# Altium footprint library General.PcbLib: 40 footprints (part 1 of 3)
Each footprint in its own frame and in the unit in brackets; x right, y up, seen from the top. Pads: shape width x height; smd on the part's side, far side on the other; paste and mask are expansions set on the pad; w line width, h text height; cw(c..) or ccw(c..) is an arc to the next point about the centre after c.
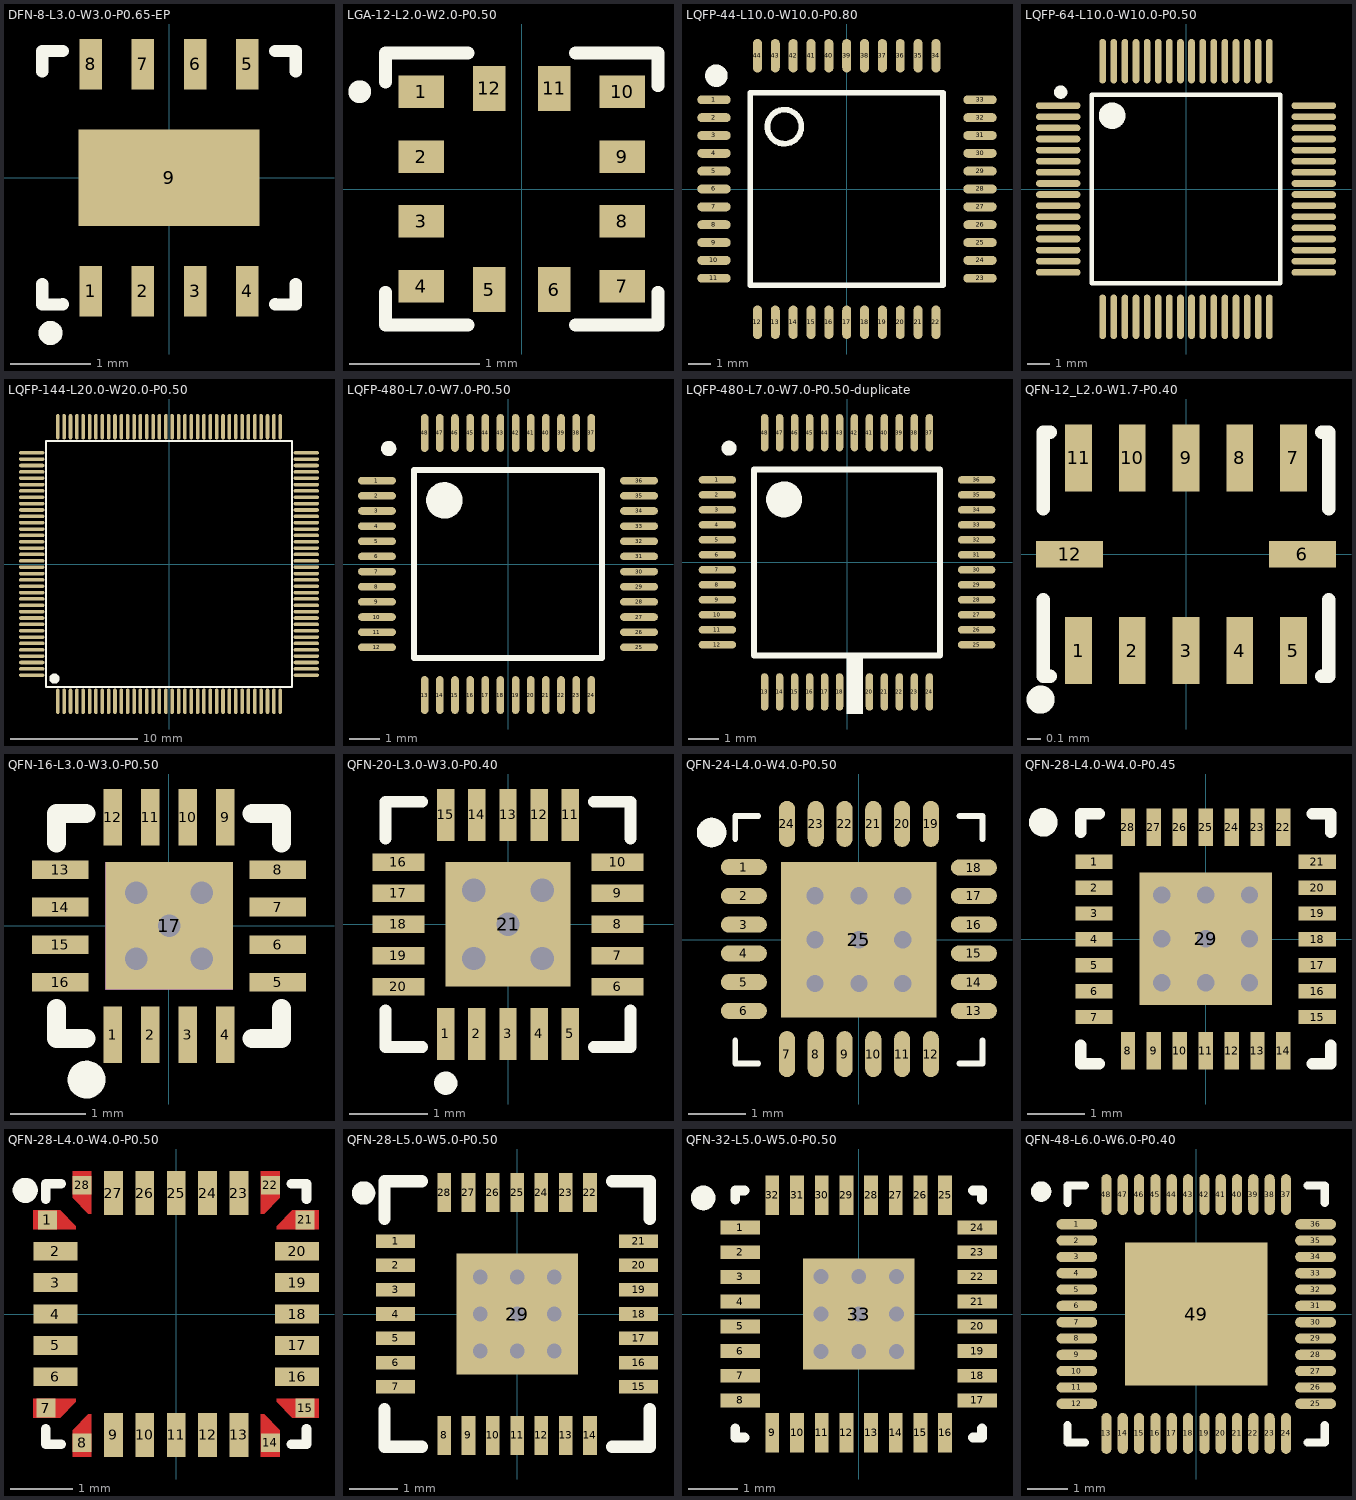
[diagram p0: the footprints below, top view; thin cyan lines are the x and y axes]

## DFN-8-L3.0-W3.0-P0.65-EP [mm] "SIT3088ETK"
pads (9):
  rect 0.28x0.625 smd mask+0.05: 1(-0.975,-1.412) 2(-0.325,-1.412) 3(0.325,-1.412) 4(0.975,-1.412) 5(0.975,1.412) 6(0.325,1.412) 7(-0.325,1.412) 8(-0.975,1.412)
  rect 2.25x1.2 smd mask+0.05: 9(0,0)
Top Overlay:
  circle w0.15: c-1.473,-1.93 r0.075
  lines w0.152: -1.576,-1.32 -1.576,-1.576 -1.321,-1.575 ; -1.576,1.32 -1.576,1.576 -1.321,1.575 ; 1.321,-1.575 1.576,-1.576 1.576,-1.32 ; 1.321,1.575 1.576,1.576 1.576,1.32
3D body "DFN-8-EP(3x3).STEP": height 0.91, standoff 0, extent -1.5,-1.51 1.5,1.51

## LGA-12-L2.0-W2.0-P0.50 [mm] "LIS2DW12TR"
pads (12):
  rect 0.35x0.25 smd mask+0.05: 1(-0.775,0.75) 2(-0.775,0.25) 3(-0.775,-0.25) 4(-0.775,-0.75) 7(0.775,-0.75) 8(0.775,-0.25) 9(0.775,0.25) 10(0.775,0.75)
  rect 0.25x0.35 smd mask+0.05: 5(-0.25,-0.775) 6(0.25,-0.775) 11(0.25,0.775) 12(-0.25,0.775)
Top Overlay:
  circle w0.15: c-1.25,0.75 r0.013
  lines w0.1: -1.051,-0.796 -1.051,-1.05 -0.416,-1.05 ; -1.05,0.824 -1.05,1.05 -0.415,1.05 ; 0.415,-1.05 1.05,-1.05 1.05,-0.796 ; 0.415,1.05 1.05,1.05 1.05,0.796
3D body "LGA-12(2x2).step": height 1.02, standoff 0, extent -1,-1 1,1

## LQFP-44-L10.0-W10.0-P0.80 [mm] "STC12 10x10mm,0.8mm"
height 1.75
pads (44):
  oval 1.5x0.4 smd: 1(-5.964,4) 2(-5.964,3.2) 3(-5.964,2.4) 4(-5.964,1.6) 5(-5.964,0.8) 6(-5.964,0) 7(-5.964,-0.8) 8(-5.964,-1.6) 9(-5.964,-2.4) 10(-5.964,-3.2) 11(-5.964,-4) 23(5.964,-4) 24(5.964,-3.2) 25(5.964,-2.4) 26(5.964,-1.6) 27(5.964,-0.8) 28(5.964,0) 29(5.964,0.8) 30(5.964,1.6) 31(5.964,2.4) 32(5.964,3.2) 33(5.964,4)
  oval 0.4x1.5 smd: 12(-4.013,-5.975) 13(-3.213,-5.975) 14(-2.413,-5.975) 15(-1.613,-5.975) 16(-0.813,-5.975) 17(-0.014,-5.975) 18(0.787,-5.975) 19(1.587,-5.975) 20(2.387,-5.975) 21(3.187,-5.975) 22(3.987,-5.975) 34(3.987,5.975) 35(3.187,5.975) 36(2.387,5.975) 37(1.587,5.975) 38(0.787,5.975) 39(-0.014,5.975) 40(-0.813,5.975) 41(-1.613,5.975) 42(-2.413,5.975) 43(-3.213,5.975) 44(-4.013,5.975)
Top Overlay:
  circle w0.508: c-5.856,5.08 r0.25
  circle w0.254: c-2.808,2.794 r0.762
  lines w0.254: -4.332,-4.318 -4.332,4.318 4.304,4.318 4.304,-4.318 -4.332,-4.318
3D body "LQFP44-10x10.STEP": height 1.45, standoff 0, extent -6.016,-6.003 5.989,6.003

## LQFP-64-L10.0-W10.0-P0.50 [mm] "L10.0-W10.0-P0.50"
pads (64):
  oval 2x0.3 smd paste+0 mask+0.051: 1(-5.75,3.75) 2(-5.75,3.25) 3(-5.75,2.75) 4(-5.75,2.25) 5(-5.75,1.75) 6(-5.75,1.25) 7(-5.75,0.75) 8(-5.75,0.25) 9(-5.75,-0.25) 10(-5.75,-0.75) 11(-5.75,-1.25) 12(-5.75,-1.75) 13(-5.75,-2.25) 14(-5.75,-2.75) 15(-5.75,-3.25) 16(-5.75,-3.75) 33(5.75,-3.75) 34(5.75,-3.25) 35(5.75,-2.75) 36(5.75,-2.25) 37(5.75,-1.75) 38(5.75,-1.25) 39(5.75,-0.75) 40(5.75,-0.25) 41(5.75,0.25) 42(5.75,0.75) 43(5.75,1.25) 44(5.75,1.75) 45(5.75,2.25) 46(5.75,2.75) 47(5.75,3.25) 48(5.75,3.75)
  oval 0.3x2 smd paste+0 mask+0.051: 17(-3.75,-5.75) 18(-3.25,-5.75) 19(-2.75,-5.75) 20(-2.25,-5.75) 21(-1.75,-5.75) 22(-1.25,-5.75) 23(-0.75,-5.75) 24(-0.25,-5.75) 25(0.25,-5.75) 26(0.75,-5.75) 27(1.25,-5.75) 28(1.75,-5.75) 29(2.25,-5.75) 30(2.75,-5.75) 31(3.25,-5.75) 32(3.75,-5.75) 49(3.75,5.75) 50(3.25,5.75) 51(2.75,5.75) 52(2.25,5.75) 53(1.75,5.75) 54(1.25,5.75) 55(0.75,5.75) 56(0.25,5.75) 57(-0.25,5.75) 58(-0.75,5.75) 59(-1.25,5.75) 60(-1.75,5.75) 61(-2.25,5.75) 62(-2.75,5.75) 63(-3.25,5.75) 64(-3.75,5.75)
Top Overlay:
  lines w0.2: -4.25,-4.25 -4.25,4.25 4.25,4.25 4.25,-4.25 -4.25,-4.25
  lines w0.3: -5.49,4.359 cw(c-5.64,4.36) -5.49,4.361
  lines w0.6: -3.025,3.294 cw(c-3.325,3.297) -3.025,3.299
3D body "LQFP-64(10x10).STEP": height 1.45, standoff 0, extent -6.003,-6.003 6.003,6.003

## LQFP-144-L20.0-W20.0-P0.50 [mm] "STM32F10xZE,0.5mm"
pads (144):
  oval 0.28x2 smd mask+0.051: 1(-8.75,-10.8) 2(-8.25,-10.8) 3(-7.75,-10.8) 4(-7.25,-10.8) 5(-6.75,-10.8) 6(-6.25,-10.8) 7(-5.75,-10.8) 8(-5.25,-10.8) 9(-4.75,-10.8) 10(-4.25,-10.8) 11(-3.75,-10.8) 12(-3.25,-10.8) 13(-2.75,-10.8) 14(-2.25,-10.8) 15(-1.75,-10.8) 16(-1.25,-10.8) 17(-0.75,-10.8) 18(-0.25,-10.8) 19(0.25,-10.8) 20(0.75,-10.8) 21(1.25,-10.8) 22(1.75,-10.8) 23(2.25,-10.8) 24(2.75,-10.8) 25(3.25,-10.8) 26(3.75,-10.8) 27(4.25,-10.8) 28(4.75,-10.8) 29(5.25,-10.8) 30(5.75,-10.8) 31(6.25,-10.8) 32(6.75,-10.8) 33(7.25,-10.8) 34(7.75,-10.8) 35(8.25,-10.8) 36(8.75,-10.8) 73(8.75,10.8) 74(8.25,10.8) 75(7.75,10.8) 76(7.25,10.8) 77(6.75,10.8) 78(6.25,10.8) 79(5.75,10.8) 80(5.25,10.8) 81(4.75,10.8) 82(4.25,10.8) 83(3.75,10.8) 84(3.25,10.8) 85(2.75,10.8) 86(2.25,10.8) 87(1.75,10.8) 88(1.25,10.8) 89(0.75,10.8) 90(0.25,10.8) 91(-0.25,10.8) 92(-0.75,10.8) 93(-1.25,10.8) 94(-1.75,10.8) 95(-2.25,10.8) 96(-2.75,10.8) 97(-3.25,10.8) 98(-3.75,10.8) 99(-4.25,10.8) 100(-4.75,10.8) 101(-5.25,10.8) 102(-5.75,10.8) 103(-6.25,10.8) 104(-6.75,10.8) 105(-7.25,10.8) 106(-7.75,10.8) 107(-8.25,10.8) 108(-8.75,10.8)
  oval 2x0.28 smd mask+0.051: 37(10.8,-8.75) 38(10.8,-8.25) 39(10.8,-7.75) 40(10.8,-7.25) 41(10.8,-6.75) 42(10.8,-6.25) 43(10.8,-5.75) 44(10.8,-5.25) 45(10.8,-4.75) 46(10.8,-4.25) 47(10.8,-3.75) 48(10.8,-3.25) 49(10.8,-2.75) 50(10.8,-2.25) 51(10.8,-1.75) 52(10.8,-1.25) 53(10.8,-0.75) 54(10.8,-0.25) 55(10.8,0.25) 56(10.8,0.75) 57(10.8,1.25) 58(10.8,1.75) 59(10.8,2.25) 60(10.8,2.75) 61(10.8,3.25) 62(10.8,3.75) 63(10.8,4.25) 64(10.8,4.75) 65(10.8,5.25) 66(10.8,5.75) 67(10.8,6.25) 68(10.8,6.75) 69(10.8,7.25) 70(10.8,7.75) 71(10.8,8.25) 72(10.8,8.75) 109(-10.8,8.75) 110(-10.8,8.25) 111(-10.8,7.75) 112(-10.8,7.25) 113(-10.8,6.75) 114(-10.8,6.25) 115(-10.8,5.75) 116(-10.8,5.25) 117(-10.8,4.75) 118(-10.8,4.25) 119(-10.8,3.75) 120(-10.8,3.25) 121(-10.8,2.75) 122(-10.8,2.25) 123(-10.8,1.75) 124(-10.8,1.25) 125(-10.8,0.75) 126(-10.8,0.25) 127(-10.8,-0.25) 128(-10.8,-0.75) 129(-10.8,-1.25) 130(-10.8,-1.75) 131(-10.8,-2.25) 132(-10.8,-2.75) 133(-10.8,-3.25) 134(-10.8,-3.75) 135(-10.8,-4.25) 136(-10.8,-4.75) 137(-10.8,-5.25) 138(-10.8,-5.75) 139(-10.8,-6.25) 140(-10.8,-6.75) 141(-10.8,-7.25) 142(-10.8,-7.75) 143(-10.8,-8.25) 144(-10.8,-8.75)
Top Overlay:
  circle w0.4: c-9.017,-9.017 r0.2
  lines w0.152: -9.671,-9.671 9.671,-9.671 9.671,9.671 -9.671,9.671 -9.671,-9.671
3D body "STM32F4.STEP": height 2, standoff 0.1, extent -11,-11 11,11

## LQFP-480-L7.0-W7.0-P0.50 [mm] "Default STM32F10x,0.5mm"
height 1.6
pads (48):
  oval 1.25x0.25 smd: 1(-4.325,2.75) 2(-4.325,2.25) 3(-4.325,1.75) 4(-4.325,1.25) 5(-4.325,0.75) 6(-4.325,0.25) 7(-4.325,-0.25) 8(-4.325,-0.75) 9(-4.325,-1.25) 10(-4.325,-1.75) 11(-4.325,-2.25) 12(-4.325,-2.75) 25(4.325,-2.75) 26(4.325,-2.25) 27(4.325,-1.75) 28(4.325,-1.25) 29(4.325,-0.75) 30(4.325,-0.25) 31(4.325,0.25) 32(4.325,0.75) 33(4.325,1.25) 34(4.325,1.75) 35(4.325,2.25) 36(4.325,2.75)
  oval 0.25x1.25 smd: 13(-2.75,-4.325) 14(-2.25,-4.325) 15(-1.75,-4.325) 16(-1.25,-4.325) 17(-0.75,-4.325) 18(-0.25,-4.325) 19(0.25,-4.325) 20(0.75,-4.325) 21(1.25,-4.325) 22(1.75,-4.325) 23(2.25,-4.325) 24(2.75,-4.325) 37(2.75,4.325) 38(2.25,4.325) 39(1.75,4.325) 40(1.25,4.325) 41(0.75,4.325) 42(0.25,4.325) 43(-0.25,4.325) 44(-0.75,4.325) 45(-1.25,4.325) 46(-1.75,4.325) 47(-2.25,4.325) 48(-2.75,4.325)
Top Overlay:
  circle w0.25: c-3.937,3.81 r0.125
  circle w0.6: c-2.1,2.1 r0.3
  lines w0.2: -3.1,-3.1 -3.1,3.1 3.1,3.1 3.1,-3.1 -3.1,-3.1
3D body "TSQFP50P900X900X160-48L.step": height 1.6, standoff 0, extent -4.5,-4.5 4.5,4.5

## LQFP-480-L7.0-W7.0-P0.50-duplicate [mm] "STM32F10x,0.5mm"
height 1.6
pads (47):
  oval 1.25x0.25 smd: 1(-4.325,2.75) 2(-4.325,2.25) 3(-4.325,1.75) 4(-4.325,1.25) 5(-4.325,0.75) 6(-4.325,0.25) 7(-4.325,-0.25) 8(-4.325,-0.75) 9(-4.325,-1.25) 10(-4.325,-1.75) 11(-4.325,-2.25) 12(-4.325,-2.75) 25(4.325,-2.75) 26(4.325,-2.25) 27(4.325,-1.75) 28(4.325,-1.25) 29(4.325,-0.75) 30(4.325,-0.25) 31(4.325,0.25) 32(4.325,0.75) 33(4.325,1.25) 34(4.325,1.75) 35(4.325,2.25) 36(4.325,2.75)
  oval 0.25x1.25 smd: 13(-2.75,-4.325) 14(-2.25,-4.325) 15(-1.75,-4.325) 16(-1.25,-4.325) 17(-0.75,-4.325) 18(-0.25,-4.325) 20(0.75,-4.325) 21(1.25,-4.325) 22(1.75,-4.325) 23(2.25,-4.325) 24(2.75,-4.325) 37(2.75,4.325) 38(2.25,4.325) 39(1.75,4.325) 40(1.25,4.325) 41(0.75,4.325) 42(0.25,4.325) 43(-0.25,4.325) 44(-0.75,4.325) 45(-1.25,4.325) 46(-1.75,4.325) 47(-2.25,4.325) 48(-2.75,4.325)
Top Overlay:
  circle w0.6: c-2.1,2.1 r0.3
  circle w0.25: c-3.937,3.81 r0.125
  region: 0.54,-3.1 -0.02,-3.1 -0.02,-5.06 0.54,-5.06
  lines w0.2: -3.1,-3.1 3.1,-3.1 3.1,3.1 -3.1,3.1 -3.1,-3.1
3D body "TSQFP50P900X900X160-48L.step": height 1.6, standoff 0, extent -4.5,-4.5 4.5,4.5

## QFN-12_L2.0-W1.7-P0.40 [mm] "L2.0-W1.7-P0.40-TXB0104RUTR"
pads (12):
  rect 0.2x0.5 smd mask+0.05: 1(-0.8,-0.718) 2(-0.4,-0.718) 3(0,-0.718) 4(0.4,-0.718) 5(0.8,-0.718) 7(0.8,0.718) 8(0.4,0.718) 9(0,0.718) 10(-0.4,0.718) 11(-0.8,0.718)
  rect 0.5x0.2 smd mask+0.05: 6(0.867,0) 12(-0.867,0)
Top Overlay:
  circle w0.15: c-1.083,-1.083 r0.03
  lines w0.1: -1.063,-0.34 -1.063,-0.909 -1.012,-0.909 ; -1.063,0.34 -1.063,0.909 -1.012,0.909 ; 1.012,-0.909 1.063,-0.909 1.063,-0.782 1.063,-0.34 ; 1.012,0.909 1.063,0.909 1.063,0.34
3D body "UQFN-12(1.7x2).step": height 0.51, standoff 0, extent -1.01,-0.86 1.01,0.86

## QFN-16-L3.0-W3.0-P0.50 [mm] "L3.0-W3.0-P0.50-BL-EP1.7-CH343P"
pads (17):
  rect 0.25x0.75 smd mask+0.051: 1(-0.748,-1.45) 2(-0.249,-1.45) 3(0.252,-1.45) 4(0.751,-1.45) 9(0.75,1.45) 10(0.25,1.45) 11(-0.25,1.45) 12(-0.749,1.45)
  rect 0.75x0.25 smd mask+0.051: 5(1.45,-0.75) 6(1.45,-0.25) 7(1.45,0.25) 8(1.45,0.75) 13(-1.45,0.75) 14(-1.45,0.25) 15(-1.45,-0.25) 16(-1.45,-0.75)
  rect 1.7x1.7 smd mask+0.051: 17(0,0)
via 0,0 diameter 0.5 hole 0.3
via -0.438,-0.439 diameter 0.5 hole 0.3
via -0.438,0.439 diameter 0.5 hole 0.3
via 0.439,-0.439 diameter 0.5 hole 0.3
via 0.439,0.439 diameter 0.5 hole 0.3
Top Overlay:
  circle w0.254: c-1.1,-2.05 r0.125
  lines w0.254: -1.5,-1.104 -1.5,-1.5 -1.105,-1.5 ; -1.5,1.108 -1.5,1.5 -1.105,1.5 ; 1.106,1.5 1.5,1.5 1.5,1.108 ; 1.108,-1.5 1.5,-1.5 1.5,-1.104
Top Paste:
  region: -0.68,0.68 0.68,0.68 0.68,-0.68 -0.68,-0.68
  region: -1.075,0.625 -1.075,0.875 -1.825,0.875 -1.825,0.625
  region: -1.075,0.125 -1.075,0.375 -1.825,0.375 -1.825,0.125
  region: -1.075,-0.375 -1.075,-0.125 -1.825,-0.125 -1.825,-0.375
  region: -1.075,-0.875 -1.075,-0.625 -1.825,-0.625 -1.825,-0.875
  region: 1.825,0.625 1.825,0.875 1.075,0.875 1.075,0.625
  region: 1.825,0.125 1.825,0.375 1.075,0.375 1.075,0.125
  region: 1.825,-0.375 1.825,-0.125 1.075,-0.125 1.075,-0.375
  region: 1.825,-0.875 1.825,-0.625 1.075,-0.625 1.075,-0.875
  region: -0.624,1.825 -0.874,1.825 -0.874,1.075 -0.624,1.075
  region: -0.124,1.825 -0.374,1.825 -0.374,1.075 -0.124,1.075
  region: 0.376,1.825 0.126,1.825 0.126,1.075 0.376,1.075
  region: 0.876,1.825 0.626,1.825 0.626,1.075 0.876,1.075
  region: -0.623,-1.075 -0.873,-1.075 -0.873,-1.825 -0.623,-1.825
  region: -0.124,-1.075 -0.374,-1.075 -0.374,-1.825 -0.124,-1.825
  region: 0.377,-1.075 0.127,-1.075 0.127,-1.825 0.377,-1.825
  region: 0.876,-1.075 0.626,-1.075 0.626,-1.825 0.876,-1.825
Mechanical 15:
  region: -0.85,0.85 0.85,0.85 0.85,-0.85 -0.85,-0.85
3D body "User Library-QFN-16.step": height 0.9, standoff 0, extent -1.501,-1.501 1.501,1.501

## QFN-20-L3.0-W3.0-P0.40 [mm] "L3.0-W3.0-P0.4——STC8G1K08"
pads (21):
  rect 0.224x0.665 smd mask+0.051: 1(-0.8,-1.407) 2(-0.4,-1.407) 3(0,-1.407) 4(0.4,-1.407) 5(0.8,-1.407) 11(0.8,1.407) 12(0.4,1.407) 13(0,1.407) 14(-0.4,1.407) 15(-0.8,1.407)
  rect 0.665x0.224 smd mask+0.051: 6(1.407,-0.8) 7(1.407,-0.4) 8(1.407,0) 9(1.407,0.4) 10(1.407,0.8) 16(-1.407,0.8) 17(-1.407,0.4) 18(-1.407,0) 19(-1.407,-0.4) 20(-1.407,-0.8)
  rect 1.6x1.6 smd mask+0.051: 21(0,0)
via -0.439,0.439 diameter 0.5 hole 0.3
via 0.439,0.439 diameter 0.5 hole 0.3
via 0.439,-0.439 diameter 0.5 hole 0.3
via -0.439,-0.439 diameter 0.5 hole 0.3
via 0,0 diameter 0.5 hole 0.3
Top Overlay:
  circle w0.15: c-0.8,-2.04 r0.075
  lines w0.152: -1.576,-1.103 -1.576,-1.576 -1.103,-1.576 ; -1.576,1.103 -1.576,1.576 -1.103,1.576 ; 1.103,-1.576 1.576,-1.576 1.576,-1.103 ; 1.103,1.576 1.576,1.576 1.576,1.103
Top Paste:
  region: -0.688,1.075 -0.688,1.74 -0.912,1.74 -0.912,1.075
  region: 0.688,1.74 0.688,1.075 0.912,1.075 0.912,1.74
  region: 0.288,1.74 0.288,1.075 0.512,1.075 0.512,1.74
  region: -0.288,1.075 -0.288,1.74 -0.512,1.74 -0.512,1.075
  region: -0.112,1.74 -0.112,1.075 0.112,1.075 0.112,1.74
  region: -1.075,0.688 -1.075,0.912 -1.74,0.912 -1.74,0.688
  region: 1.075,0.912 1.075,0.688 1.74,0.688 1.74,0.912
  region: 0.6,-0.6 0.6,0.6 -0.6,0.6 -0.6,-0.6
  region: -1.74,0.512 -1.74,0.288 -1.075,0.288 -1.075,0.512
  region: 1.075,0.512 1.075,0.288 1.74,0.288 1.74,0.512
  region: -1.74,0.112 -1.74,-0.112 -1.075,-0.112 -1.075,0.112
  region: 1.075,0.112 1.075,-0.112 1.74,-0.112 1.74,0.112
  region: -1.74,-0.288 -1.74,-0.512 -1.075,-0.512 -1.075,-0.288
  region: 1.075,-0.288 1.075,-0.512 1.74,-0.512 1.74,-0.288
  region: -1.74,-0.688 -1.74,-0.912 -1.075,-0.912 -1.075,-0.688
  region: 1.075,-0.688 1.075,-0.912 1.74,-0.912 1.74,-0.688
  region: 0.688,-1.075 0.688,-1.74 0.912,-1.74 0.912,-1.075
  region: -0.688,-1.74 -0.688,-1.075 -0.912,-1.075 -0.912,-1.74
  region: 0.288,-1.075 0.288,-1.74 0.512,-1.74 0.512,-1.075
  region: -0.112,-1.075 -0.112,-1.74 0.112,-1.74 0.112,-1.075
  region: -0.512,-1.075 -0.512,-1.74 -0.288,-1.74 -0.288,-1.075
3D body "User Library-QFN40P300X300X60-20.step": height 0.6, standoff 0, extent -1.55,-1.55 1.55,1.55

## QFN-24-L4.0-W4.0-P0.50 [mm] "L4.0-W4.0-P0.50-MPU6050"
pads (25):
  oval 0.8x0.28 smd paste-100 mask+0.05: 1(-2,1.262) 2(-2,0.763) 3(-2,0.262) 4(-2,-0.237) 5(-2,-0.738) 6(-2,-1.237) 13(2,-1.237) 14(2,-0.738) 15(2,-0.237) 16(2,0.262) 17(2,0.763) 18(2,1.255)
  oval 0.28x0.8 smd paste-100 mask+0.05: 7(-1.25,-1.988) 8(-0.75,-1.988) 9(-0.25,-1.988) 10(0.25,-1.988) 11(0.75,-1.988) 12(1.25,-1.988) 19(1.25,2.012) 20(0.75,2.012) 21(0.25,2.012) 22(-0.25,2.012) 23(-0.75,2.012) 24(-1.25,2.012)
  rect 2.7x2.7 smd paste-100 mask+0.05: 25(0,0)
via 0,0 diameter 0.5 hole 0.3
via -0.762,0.762 diameter 0.5 hole 0.3
via 0,0.762 diameter 0.5 hole 0.3
via 0.762,0.762 diameter 0.5 hole 0.3
via 0.762,0 diameter 0.5 hole 0.3
via -0.762,0 diameter 0.5 hole 0.3
via -0.762,-0.762 diameter 0.5 hole 0.3
via 0,-0.762 diameter 0.5 hole 0.3
via 0.762,-0.762 diameter 0.5 hole 0.3
Top Overlay:
  region: -2.559,1.609 -2.536,1.609 -2.493,1.617 -2.451,1.632 -2.413,1.654 -2.379,1.683 -2.351,1.717 -2.328,1.756 -2.313,1.797 -2.306,1.841 -2.306,1.885 -2.314,1.929 -2.329,1.971 -2.351,2.009 -2.38,2.043 -2.414,2.072 -2.452,2.094 -2.494,2.109 -2.538,2.117 -2.582,2.117 -2.626,2.109 -2.667,2.094 -2.706,2.072 -2.74,2.043 -2.769,2.009 -2.791,1.971 -2.806,1.929 -2.814,1.885 -2.814,1.841 -2.806,1.797 -2.791,1.756 -2.769,1.717 -2.741,1.683 -2.707,1.654 -2.669,1.632 -2.627,1.617 -2.583,1.609 -2.561,1.609
  lines w0.1: -2.15,-1.75 -2.15,-2.15 -1.75,-2.15 ; -2.15,1.75 -2.15,2.15 -1.75,2.15 ; 1.75,-2.15 2.15,-2.15 2.15,-1.75 ; 1.75,2.15 2.15,2.15 2.15,1.75
Top Paste:
  drawing of 25 lines, arcs and shapes, not listed
3D body "User Library-QFN 24 4x4.step": height 0.9, standoff 0, extent -2.002,-1.996 2.002,2.008

## QFN-28-L4.0-W4.0-P0.45 [mm] "L4.0-W4.0-P0.45——ATmega328P_MMHR"
pads (29):
  rect 0.65x0.25 smd mask+0.06: 1(-1.94,1.344) 2(-1.94,0.894) 3(-1.94,0.444) 4(-1.94,-0.006) 5(-1.94,-0.456) 6(-1.94,-0.906) 7(-1.94,-1.356) 15(1.94,-1.356) 16(1.94,-0.906) 17(1.94,-0.456) 18(1.94,-0.006) 19(1.94,0.444) 20(1.94,0.894) 21(1.94,1.344)
  rect 0.25x0.65 smd mask+0.06: 8(-1.35,-1.945) 9(-0.9,-1.945) 10(-0.45,-1.945) 11(0,-1.945) 12(0.45,-1.945) 13(0.9,-1.945) 14(1.35,-1.945) 22(1.35,1.945) 23(0.9,1.945) 24(0.45,1.945) 25(0,1.945) 26(-0.45,1.945) 27(-0.9,1.945) 28(-1.35,1.945)
  rect 2.3x2.3 smd: 29(0,0.004)
via 0,0.004 diameter 0.5 hole 0.3
via -0.762,0.766 diameter 0.5 hole 0.3
via 0,0.766 diameter 0.5 hole 0.3
via 0.762,0.766 diameter 0.5 hole 0.3
via 0.762,0.004 diameter 0.5 hole 0.3
via -0.762,0.004 diameter 0.5 hole 0.3
via -0.762,-0.758 diameter 0.5 hole 0.3
via 0,-0.758 diameter 0.5 hole 0.3
via 0.762,-0.758 diameter 0.5 hole 0.3
Top Overlay:
  lines w0.201: -2.174,-1.845 -2.174,-2.17 -1.849,-2.17 ; -2.174,1.853 -2.174,2.178 -1.849,2.178 ; 1.85,-2.17 2.175,-2.17 2.175,-1.845 ; 1.85,2.178 2.175,2.178 2.175,1.853
  lines w0.249: -2.7,2.026 cw(c-2.824,2.027) -2.7,2.028
3D body "零件65.STEP": height 0.91, standoff -0.02, extent -2.003,-1.999 2.004,2.007

## QFN-28-L4.0-W4.0-P0.50 [mm] "STM32G031-L4.0-W4.0-P0.50"
pads (28):
  rect 0.3x0.3 smd mask+0.05: 1(-2.052,1.5) 7(-2.076,-1.5) 8(-1.5,-2.052) 14(1.5,-2.052) 15(2.052,-1.5) 21(2.052,1.5) 22(1.5,2.052) 28(-1.5,2.052)
  rect 0.7x0.3 smd paste+0 mask+0.05: 2(-1.925,1) 3(-1.925,0.5) 4(-1.925,0) 5(-1.925,-0.5) 6(-1.925,-1) 16(1.925,-1) 17(1.925,-0.5) 18(1.925,0) 19(1.925,0.5) 20(1.925,1)
  rect 0.3x0.7 smd paste+0 mask+0.05: 9(-1,-1.925) 10(-0.5,-1.925) 11(0,-1.925) 12(0.5,-1.925) 13(1,-1.925) 23(1,1.925) 24(0.5,1.925) 25(0,1.925) 26(-0.5,1.925) 27(-1,1.925)
Top Layer:
  region: -1.85,-1.65 -2.275,-1.65 -2.275,-1.35 -1.6,-1.35 -1.6,-1.4
  region: -1.65,-1.85 -1.65,-2.275 -1.35,-2.275 -1.35,-1.6 -1.4,-1.6
  region: -1.65,1.85 -1.65,2.275 -1.35,2.275 -1.35,1.6 -1.4,1.6
  region: -1.85,1.65 -2.275,1.65 -2.275,1.35 -1.6,1.35 -1.6,1.4
  region: 1.85,1.65 2.275,1.65 2.275,1.35 1.6,1.35 1.6,1.4
  region: 1.65,1.85 1.65,2.275 1.35,2.275 1.35,1.6 1.4,1.6
  region: 1.85,-1.65 2.275,-1.65 2.275,-1.35 1.6,-1.35 1.6,-1.4
  region: 1.65,-1.85 1.65,-2.275 1.35,-2.275 1.35,-1.6 1.4,-1.6
Top Overlay:
  circle w0.2: c-2.405,1.97 r0.1
  lines w0.152: -2.076,-1.83 -2.076,-2.076 -1.83,-2.076 ; -2.076,1.831 -2.076,2.076 -1.83,2.076 ; 1.831,-2.076 2.076,-2.076 2.076,-1.83 ; 1.831,2.076 2.076,2.076 2.076,1.831
3D body "UFQFPN-28(4x4).STEP": height 0.61, standoff 0, extent -2.01,-2.019 2.02,2.01

## QFN-28-L5.0-W5.0-P0.50 [mm] "QFN-28-L5.0-W5.0-P0.5——CP2102"
pads (29):
  rect 0.8x0.28 smd: 1(-2.5,1.5) 2(-2.5,1) 3(-2.5,0.5) 4(-2.5,0) 5(-2.5,-0.5) 6(-2.5,-1) 7(-2.5,-1.5) 15(2.5,-1.5) 16(2.5,-1) 17(2.5,-0.5) 18(2.5,0) 19(2.5,0.5) 20(2.5,1) 21(2.5,1.5)
  rect 0.28x0.8 smd: 8(-1.5,-2.5) 9(-1,-2.5) 10(-0.5,-2.5) 11(0,-2.5) 12(0.5,-2.5) 13(1,-2.5) 14(1.5,-2.5) 22(1.5,2.5) 23(1,2.5) 24(0.5,2.5) 25(0,2.5) 26(-0.5,2.5) 27(-1,2.5) 28(-1.5,2.5)
  rect 2.5x2.5 smd: 29(0,0)
via 0.762,-0.762 diameter 0.5 hole 0.3
via 0,-0.762 diameter 0.5 hole 0.3
via -0.762,-0.762 diameter 0.5 hole 0.3
via -0.762,0 diameter 0.5 hole 0.3
via 0.762,0 diameter 0.5 hole 0.3
via 0.762,0.762 diameter 0.5 hole 0.3
via 0,0.762 diameter 0.5 hole 0.3
via -0.762,0.762 diameter 0.5 hole 0.3
via 0,0 diameter 0.5 hole 0.3
Top Overlay:
  circle w0.254: c-3.16,2.49 r0.114
  lines w0.254: -2.73,-1.96 -2.73,-2.73 -1.96,-2.73 ; -2.73,1.96 -2.73,2.73 -1.96,2.73 ; 1.96,-2.73 2.73,-2.73 2.73,-1.96 ; 1.96,2.73 2.73,2.73 2.73,1.96
3D body "User Library-QFN28-0_5.STEP": height 1, standoff 0, extent -2.514,-2.503 2.486,2.497

## QFN-32-L5.0-W5.0-P0.50 [mm] "L5.0-W5.0-P0.5——ESP8266EX"
height 1
pads (33):
  rect 0.8x0.28 smd mask+0.051: 1(-2.4,1.75) 2(-2.4,1.25) 3(-2.4,0.75) 4(-2.4,0.25) 5(-2.4,-0.25) 6(-2.4,-0.75) 7(-2.4,-1.25) 8(-2.4,-1.75) 17(2.4,-1.75) 18(2.4,-1.25) 19(2.4,-0.75) 20(2.4,-0.25) 21(2.4,0.25) 22(2.4,0.75) 23(2.4,1.25) 24(2.4,1.75)
  rect 0.28x0.8 smd mask+0.051: 9(-1.75,-2.4) 10(-1.25,-2.4) 11(-0.75,-2.4) 12(-0.25,-2.4) 13(0.25,-2.4) 14(0.75,-2.4) 15(1.25,-2.4) 16(1.75,-2.4) 25(1.75,2.4) 26(1.25,2.4) 27(0.75,2.4) 28(0.25,2.4) 29(-0.25,2.4) 30(-0.75,2.4) 31(-1.25,2.4) 32(-1.75,2.4)
  rect 2.25x2.25 smd: 33(0,0)
via 0.762,-0.762 diameter 0.5 hole 0.3
via 0,-0.762 diameter 0.5 hole 0.3
via -0.762,-0.762 diameter 0.5 hole 0.3
via -0.762,0 diameter 0.5 hole 0.3
via 0.762,0 diameter 0.5 hole 0.3
via 0.762,0.762 diameter 0.5 hole 0.3
via 0,0.762 diameter 0.5 hole 0.3
via -0.762,0.762 diameter 0.5 hole 0.3
via 0,0 diameter 0.5 hole 0.3
Top Overlay:
  circle w0.25: c-3.15,2.35 r0.125
  lines w0.2: -2.5,-2.315 -2.5,-2.5 -2.315,-2.5 ; -2.5,2.315 -2.5,2.5 -2.315,2.5 ; 2.315,-2.5 2.5,-2.5 2.5,-2.315 ; 2.315,2.5 2.5,2.5 2.5,2.315
Mechanical 15:
  lines w0.1: -0.5,0 0.5,0 ; 0,-0.5 0,0.5
3D body "User Library-ESP8266EX.step": height 0.85, standoff 0, extent -2.55,-2.55 2.55,2.55

## QFN-48-L6.0-W6.0-P0.40 [mm] "L6.0-W6.0-P0.4——NS1081"
height 0.8
pads (49):
  oval 1x0.25 smd: 1(-2.925,2.2) 2(-2.925,1.8) 3(-2.925,1.4) 4(-2.925,1) 5(-2.925,0.6) 6(-2.925,0.2) 7(-2.925,-0.2) 8(-2.925,-0.6) 9(-2.925,-1) 10(-2.925,-1.4) 11(-2.925,-1.8) 12(-2.925,-2.2) 25(2.925,-2.2) 26(2.925,-1.8) 27(2.925,-1.4) 28(2.925,-1) 29(2.925,-0.6) 30(2.925,-0.2) 31(2.925,0.2) 32(2.925,0.6) 33(2.925,1) 34(2.925,1.4) 35(2.925,1.8) 36(2.925,2.2)
  oval 0.25x1 smd: 13(-2.2,-2.925) 14(-1.8,-2.925) 15(-1.4,-2.925) 16(-1,-2.925) 17(-0.6,-2.925) 18(-0.2,-2.925) 19(0.2,-2.925) 20(0.6,-2.925) 21(1,-2.925) 22(1.4,-2.925) 23(1.8,-2.925) 24(2.2,-2.925) 37(2.2,2.925) 38(1.8,2.925) 39(1.4,2.925) 40(1,2.925) 41(0.6,2.925) 42(0.2,2.925) 43(-0.2,2.925) 44(-0.6,2.925) 45(-1,2.925) 46(-1.4,2.925) 47(-1.8,2.925) 48(-2.2,2.925)
  rect 3.5x3.5 smd: 49(0,0)
Top Overlay:
  circle w0.25: c-3.8,3 r0.125
  lines w0.2: -3.15,-2.725 -3.15,-3.15 -2.725,-3.15 ; -3.15,2.725 -3.15,3.15 -2.725,3.15 ; 2.725,-3.15 3.15,-3.15 3.15,-2.725 ; 2.725,3.15 3.15,3.15 3.15,2.725
3D body "QFN40P600X600X80_HS-49N.step": height 0.8, standoff 0, extent -3.1,-3.1 3.1,3.1